# Altium footprint library clusterhead.PcbLib: 75 footprints (part 2 of 5)
Each footprint in its own frame and in the unit in brackets; x right, y up, seen from the top. Pads: shape width x height; smd on the part's side, far side on the other; paste and mask are expansions set on the pad; w line width, h text height; cw(c..) or ccw(c..) is an arc to the next point about the centre after c.
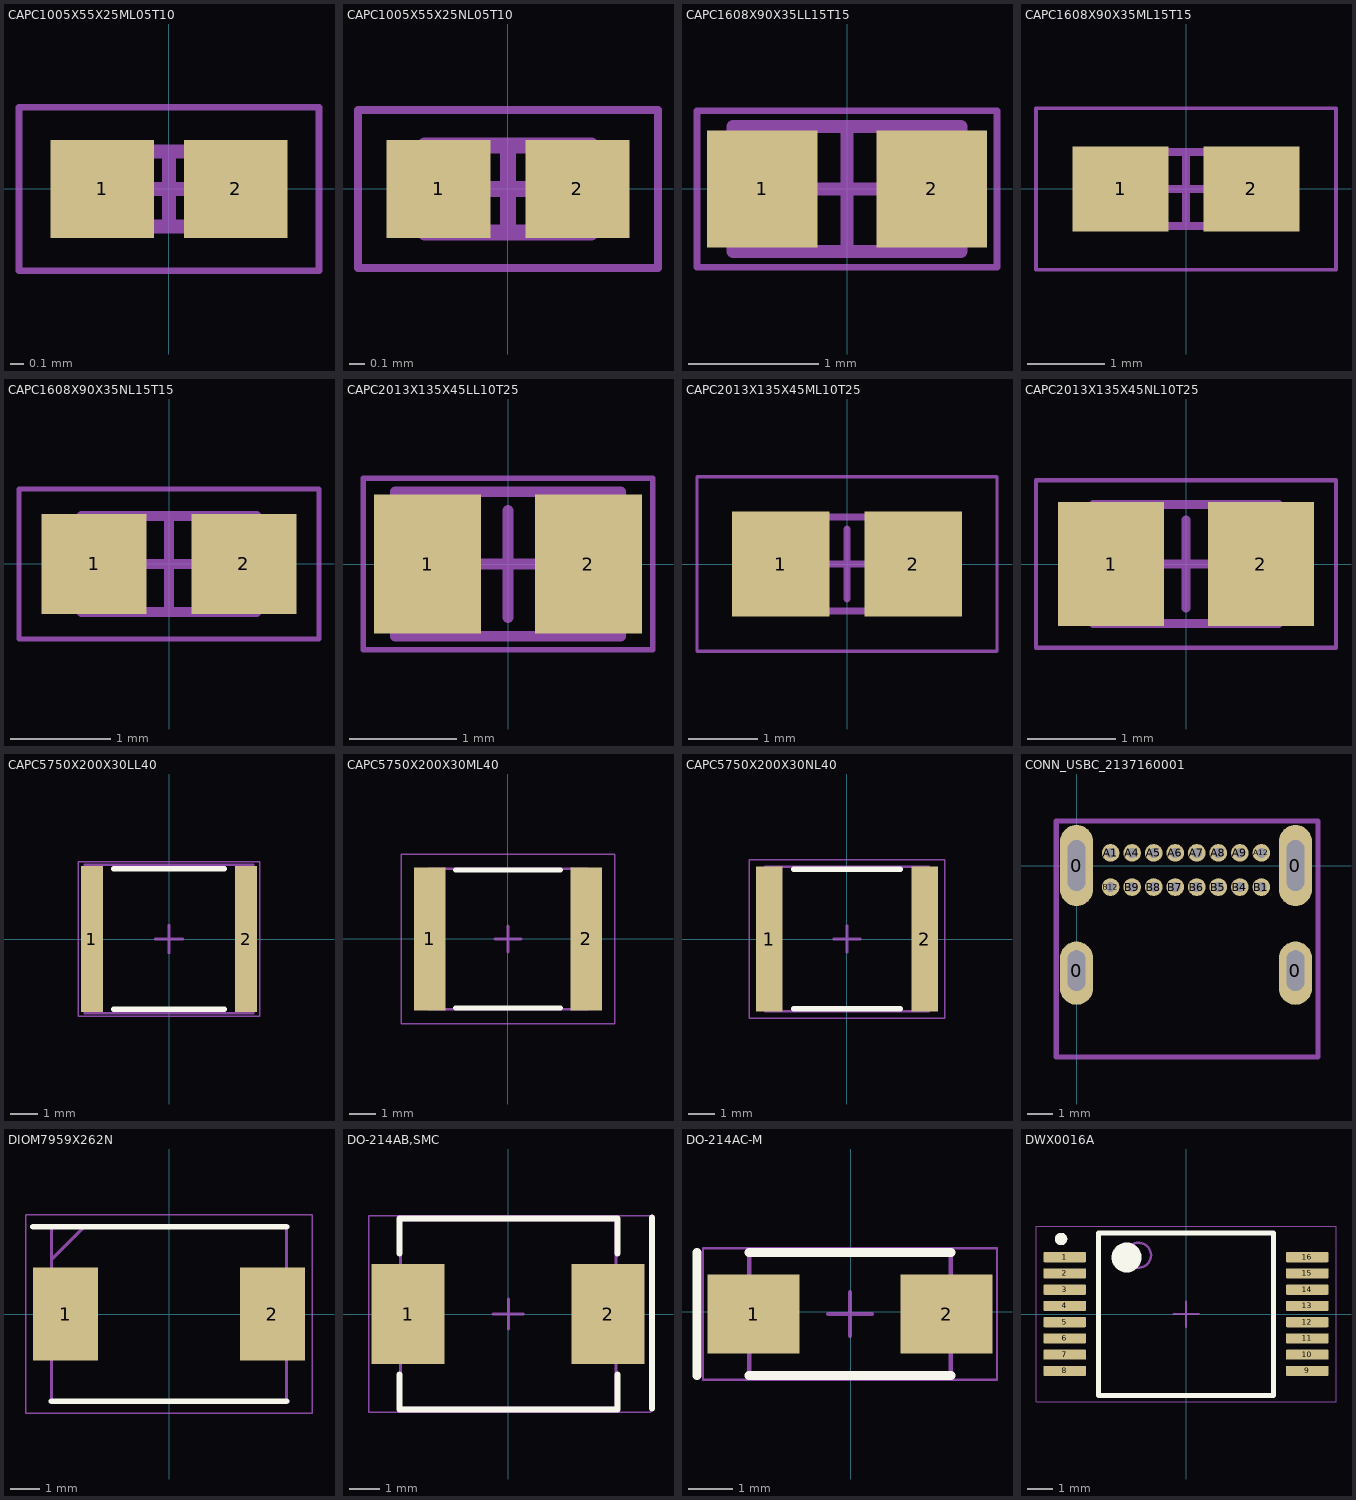
[diagram p1: the footprints below, top view; thin cyan lines are the x and y axes]

## CAPC1005X55X25ML05T10 [mm] "Chip Capacitor, 2-Leads, Body 1.00x0.50mm, IPC Low Density"
height 0.55
pads (2):
  rect 0.76x0.72 smd: 1(-0.49,0) 2(0.49,0)
Mechanical 13:
  lines w0.1: -0.525,-0.275 0.525,-0.275 0.525,0.275 -0.525,0.275 -0.525,-0.275
Mechanical 15:
  lines w0.05: -1.1,-0.6 1.1,-0.6 1.1,0.6 -1.1,0.6 -1.1,-0.6
  lines w0.1: -0.275,0 0.275,0 ; 0,-0.275 0,0.275
3D body: height 0.55, standoff 0, extent 0.275,-0.275 0.525,0.275
3D body: height 0.55, standoff 0, extent -0.525,-0.275 -0.275,0.275
3D body: height 0.55, standoff 0, extent -0.275,-0.275 0.275,0.275

## CAPC1005X55X25NL05T10 [mm] "Chip Capacitor, 2-Leads, Body 1.00x0.50mm, IPC Medium Density"
height 0.55
pads (2):
  rect 0.66x0.62 smd: 1(-0.44,0) 2(0.44,0)
Mechanical 13:
  lines w0.1: -0.525,-0.275 -0.525,0.275 0.525,0.275 0.525,-0.275 -0.525,-0.275
Mechanical 15:
  lines w0.05: -0.95,-0.5 -0.95,0.5 0.95,0.5 0.95,-0.5 -0.95,-0.5
  lines w0.1: -0.275,0 0.275,0 ; 0,-0.275 0,0.275
3D body: height 0.55, standoff 0, extent -0.275,-0.275 0.275,0.275
3D body: height 0.55, standoff 0, extent -0.525,-0.275 -0.275,0.275
3D body: height 0.55, standoff 0, extent 0.275,-0.275 0.525,0.275

## CAPC1608X90X35LL15T15 [mm] "Chip Capacitor, 2-Leads, Body 1.60x0.81mm, IPC High Density"
height 0.9
pads (2):
  rect 0.85x0.9 smd: 1(-0.65,0) 2(0.65,0)
Mechanical 13:
  lines w0.1: -0.875,-0.48 0.875,-0.48 0.875,0.48 -0.875,0.48 -0.875,-0.48
Mechanical 15:
  lines w0.05: -1.15,-0.6 1.15,-0.6 1.15,0.6 -1.15,0.6 -1.15,-0.6
  lines w0.1: -0.48,0 0.48,0 ; 0,-0.48 0,0.48
3D body: height 0.9, standoff 0, extent 0.525,-0.48 0.875,0.48
3D body: height 0.9, standoff 0, extent -0.875,-0.48 -0.525,0.48
3D body: height 0.9, standoff 0, extent -0.525,-0.48 0.525,0.48

## CAPC1608X90X35ML15T15 [mm] "Chip Capacitor, 2-Leads, Body 1.60x0.81mm, IPC Low Density"
height 0.9
pads (2):
  rect 1.25x1.1 smd: 1(-0.85,0) 2(0.85,0)
Mechanical 13:
  lines w0.1: -0.875,-0.48 -0.875,0.48 0.875,0.48 0.875,-0.48 -0.875,-0.48
Mechanical 15:
  lines w0.05: -1.95,-1.05 -1.95,1.05 1.95,1.05 1.95,-1.05 -1.95,-1.05
  lines w0.1: -0.48,0 0.48,0 ; 0,-0.48 0,0.48
3D body: height 0.9, standoff 0, extent -0.525,-0.48 0.525,0.48
3D body: height 0.9, standoff 0, extent -0.875,-0.48 -0.525,0.48
3D body: height 0.9, standoff 0, extent 0.525,-0.48 0.875,0.48

## CAPC1608X90X35NL15T15 [mm] "Chip Capacitor, 2-Leads, Body 1.60x0.81mm, IPC Medium Density"
height 0.9
pads (2):
  rect 1.05x1 smd: 1(-0.75,0) 2(0.75,0)
Mechanical 13:
  lines w0.1: -0.875,-0.48 -0.875,0.48 0.875,0.48 0.875,-0.48 -0.875,-0.48
Mechanical 15:
  lines w0.05: -1.5,-0.75 -1.5,0.75 1.5,0.75 1.5,-0.75 -1.5,-0.75
  lines w0.1: -0.48,0 0.48,0 ; 0,-0.48 0,0.48
3D body: height 0.9, standoff 0, extent -0.525,-0.48 0.525,0.48
3D body: height 0.9, standoff 0, extent -0.875,-0.48 -0.525,0.48
3D body: height 0.9, standoff 0, extent 0.525,-0.48 0.875,0.48

## CAPC2013X135X45LL10T25 [mm] "Chip Capacitor, 2-Leads, Body 2.00x1.25mm, IPC High Density"
height 1.35
pads (2):
  rect 1x1.3 smd: 1(-0.75,0) 2(0.75,0)
Mechanical 13:
  lines w0.1: -1.05,-0.675 -1.05,0.675 1.05,0.675 1.05,-0.675 -1.05,-0.675
Mechanical 15:
  lines w0.05: -1.35,-0.8 -1.35,0.8 1.35,0.8 1.35,-0.8 -1.35,-0.8
  lines w0.1: -0.5,0 0.5,0 ; 0,-0.5 0,0.5
3D body: height 1.35, standoff 0, extent -0.6,-0.675 0.6,0.675
3D body: height 1.35, standoff 0, extent -1.05,-0.675 -0.6,0.675
3D body: height 1.35, standoff 0, extent 0.6,-0.675 1.05,0.675

## CAPC2013X135X45ML10T25 [mm] "Chip Capacitor, 2-Leads, Body 2.10x1.35mm, IPC Low Density"
height 1.35
pads (2):
  rect 1.4x1.5 smd: 1(-0.95,0) 2(0.95,0)
Mechanical 13:
  lines w0.1: -1.05,-0.675 -1.05,0.675 1.05,0.675 1.05,-0.675 -1.05,-0.675
Mechanical 15:
  lines w0.05: -2.15,-1.25 -2.15,1.25 2.15,1.25 2.15,-1.25 -2.15,-1.25
  lines w0.1: -0.5,0 0.5,0 ; 0,-0.5 0,0.5
3D body: height 1.35, standoff 0, extent -0.6,-0.675 0.6,0.675
3D body: height 1.35, standoff 0, extent -1.05,-0.675 -0.6,0.675
3D body: height 1.35, standoff 0, extent 0.6,-0.675 1.05,0.675

## CAPC2013X135X45NL10T25 [mm] "Chip Capacitor, 2-Leads, Body 2.10x1.35mm, IPC Medium Density"
height 1.35
pads (2):
  rect 1.2x1.4 smd: 1(-0.85,0) 2(0.85,0)
Mechanical 13:
  lines w0.1: -1.05,-0.675 -1.05,0.675 1.05,0.675 1.05,-0.675 -1.05,-0.675
Mechanical 15:
  lines w0.05: -1.7,-0.95 -1.7,0.95 1.7,0.95 1.7,-0.95 -1.7,-0.95
  lines w0.1: -0.5,0 0.5,0 ; 0,-0.5 0,0.5
3D body "CAPC2012X14N.step": height 1.35, standoff 0, extent -1.05,-0.675 1.05,0.675

## CAPC5750X200X30LL40 [mm] "Chip Capacitor, 2-Leads, Body 6.1x5.4mm, IPC High Density"
height 2
pads (2):
  rect 0.8x5.3 smd: 1(-2.8,0) 2(2.8,0)
Top Overlay:
  lines w0.2: -2,-2.55 2,-2.55 ; -2,2.55 2,2.55
Mechanical 13:
  lines w0.1: -3.05,-2.7 -3.05,2.7 3.05,2.7 3.05,-2.7 -3.05,-2.7
Mechanical 15:
  lines w0.05: -3.3,-2.8 -3.3,2.8 3.3,2.8 3.3,-2.8 -3.3,-2.8
  lines w0.1: -0.5,0 0.5,0 ; 0,-0.5 0,0.5
3D body "CAPC5850X20L.step": height 2, standoff 0, extent -3.05,-2.7 3.05,2.7

## CAPC5750X200X30ML40 [mm] "Chip Capacitor, 2-Leads, Body 6.1x5.4mm, IPC Low Density"
height 2
pads (2):
  rect 1.2x5.5 smd: 1(-3,0) 2(3,0)
Top Overlay:
  lines w0.2: -2,-2.65 2,-2.65 ; -2,2.65 2,2.65
Mechanical 13:
  lines w0.1: -3.05,-2.7 -3.05,2.7 3.05,2.7 3.05,-2.7 -3.05,-2.7
Mechanical 15:
  lines w0.05: -4.1,-3.25 -4.1,3.25 4.1,3.25 4.1,-3.25 -4.1,-3.25
  lines w0.1: -0.5,0 0.5,0 ; 0,-0.5 0,0.5
3D body "CAPC5850X20M.step": height 2, standoff 0, extent -3.05,-2.7 3.05,2.7

## CAPC5750X200X30NL40 [mm] "Chip Capacitor, 2-Leads, Body 6.1x5.4mm, IPC Medium Density"
height 2
pads (2):
  rect 1x5.4 smd: 1(-2.9,0) 2(2.9,0)
Top Overlay:
  lines w0.2: -2,-2.6 2,-2.6 ; -2,2.6 2,2.6
Mechanical 13:
  lines w0.1: -3.05,-2.7 3.05,-2.7 3.05,2.7 -3.05,2.7 -3.05,-2.7
Mechanical 15:
  lines w0.05: -3.65,-2.95 3.65,-2.95 3.65,2.95 -3.65,2.95 -3.65,-2.95
  lines w0.1: -0.5,0 0.5,0 ; 0,-0.5 0,0.5
3D body "CAPC5850X20N.step": height 2, standoff 0, extent -3.05,-2.7 3.05,2.7

## CONN_USBC_2137160001 [mm] "USB 2.0 Type C connector"
pads (20):
  oval 1.3x2.5 hole 0.7 slot 1.6 at 90 deg copper offset 0,-0.1 mask+0: 0(0,-4.15) 0(8.64,-4.15)
  oval 1.3x3.2 hole 0.7 slot 2 at 90 deg mask+0: 0(0,0) 0(8.64,0)
  round 0.7 hole 0.4 mask+0: A1(1.345,0.5) A4(2.195,0.5) A5(3.045,0.5) A6(3.895,0.5) A7(4.745,0.5) A8(5.595,0.5) A9(6.445,0.5) A12(7.295,0.5) B1(7.295,-0.85) B4(6.445,-0.85) B5(5.595,-0.85) B6(4.745,-0.85) B7(3.895,-0.85) B8(3.045,-0.85) B9(2.195,-0.85) B12(1.345,-0.85)
Top Courtyard:
  lines w0.2: -0.8,-7.55 9.525,-7.55 9.525,1.75 -0.8,1.75 -0.8,-7.55
3D body "2137160001.stp": height 3.38, standoff -0.99, extent -0.495,-7.55 9.145,1.42

## DIOM7959X262N [mm]
pads (2):
  rect 2.2x3.15 smd: 1(-3.5,0) 2(3.5,0)
Top Overlay:
  lines w0.2: -4.6,2.952 3.97,2.952 ; -3.97,-2.952 3.97,-2.952
Mechanical 13:
  lines w0.1: -3.97,1.852 -2.87,2.952 ; -3.97,-2.952 3.97,-2.952 3.97,2.952 -3.97,2.952 -3.97,-2.952
Mechanical 15:
  lines w0.05: -4.85,-3.36 4.85,-3.36 4.85,3.36 -4.85,3.36 -4.85,-3.36
3D body "5.0SMDJ28A.stp": height 2.62, standoff 0, extent -3.97,-2.953 3.97,2.953

## DO-214AB,SMC [mm] "DO-214AB"
height 2.62
pads (2):
  rect 2.4x3.3 smd: 1(-3.3,0) 2(3.3,0)
Top Overlay:
  lines w0.2: -3.587,-1.993 -3.587,-3.143 3.613,-3.143 3.613,-1.993 ; -3.587,2.007 -3.587,3.157 3.613,3.157 3.613,2.007 ; 4.747,-3.117 4.747,3.183
Mechanical 13:
  lines w0.1: -3.542,-3.103 -3.542,3.117 3.568,3.117 3.568,-3.103 -3.542,-3.103
Mechanical 15:
  lines w0.05: -4.595,-3.243 -4.595,3.257 4.704,3.257 4.704,-3.243 -4.595,-3.243
  lines w0.1: -0.487,0.007 0.513,0.007 ; 0.013,-0.493 0.013,0.507
3D body "DIOM6959X26L.step": height 2.62, standoff 0, extent -3.762,-3.103 3.788,3.117

## DO-214AC-M [mm] "DO-214AC-Medium density"
height 2.5
pads (2):
  rect 2.1x1.8 smd: 1(-2.212,-0.048) 2(2.188,-0.048)
Top Overlay:
  lines w0.2: -3.5,-1.448 -3.5,1.352 ; -2.312,-1.448 2.288,-1.448 ; -2.312,1.352 2.288,1.352
Mechanical 13:
  lines w0.1: -2.312,-1.443 -2.312,1.347 2.288,1.347 2.288,-1.443 -2.312,-1.443
Mechanical 15:
  lines w0.05: -3.362,-1.548 -3.362,1.452 3.338,1.452 3.338,-1.548 -3.362,-1.548
  lines w0.1: -0.512,-0.048 0.488,-0.048 ; -0.012,-0.548 -0.012,0.452
3D body "INDM4326X23L.step": height 2.29, standoff 0, extent -2.532,-1.443 2.508,1.347

## DWX0016A [mm]
height 2
pads (16):
  rrect22% 1.7x0.41 smd: 1(-4.85,2.275) 2(-4.85,1.625) 3(-4.85,0.975) 4(-4.85,0.325) 5(-4.85,-0.325) 6(-4.85,-0.975) 7(-4.85,-1.625) 8(-4.85,-2.275) 9(4.85,-2.275) 10(4.85,-1.625) 11(4.85,-0.975) 12(4.85,-0.325) 13(4.85,0.325) 14(4.85,0.975) 15(4.85,1.625) 16(4.85,2.275)
Top Overlay:
  circle w0.25: c-5,3 r0.125
  circle w0.6: c-2.379,2.262 r0.3
  lines w0.2: -3.5,-3.25 -3.5,3.25 3.5,3.25 3.5,-3.25 -3.5,-3.25
Mechanical 1:
  text ".Designator" at -1.651,-0.254 h1
Mechanical 13:
  circle w0.1: c-1.9,2.35 r0.5
  lines w0.1: -3.5,-3.25 -3.5,3.25 3.5,3.25 3.5,-3.25 -3.5,-3.25
Mechanical 15:
  lines w0.05: -6,-3.5 -6,3.5 6,3.5 6,-3.5 -6,-3.5
  lines w0.1: -0.5,0 0.5,0 ; 0,-0.5 0,0.5
3D body "SSOP16_DWX_TEX.step": height 2.59, standoff 0, extent -5.22,-2.972 5.22,2.972